# Altium footprint library rus.PcbLib: 72 footprints (part 5 of 5)
Each footprint in its own frame and in the unit in brackets; x right, y up, seen from the top. Pads: shape width x height; smd on the part's side, far side on the other; paste and mask are expansions set on the pad; w line width, h text height; cw(c..) or ccw(c..) is an arc to the next point about the centre after c.
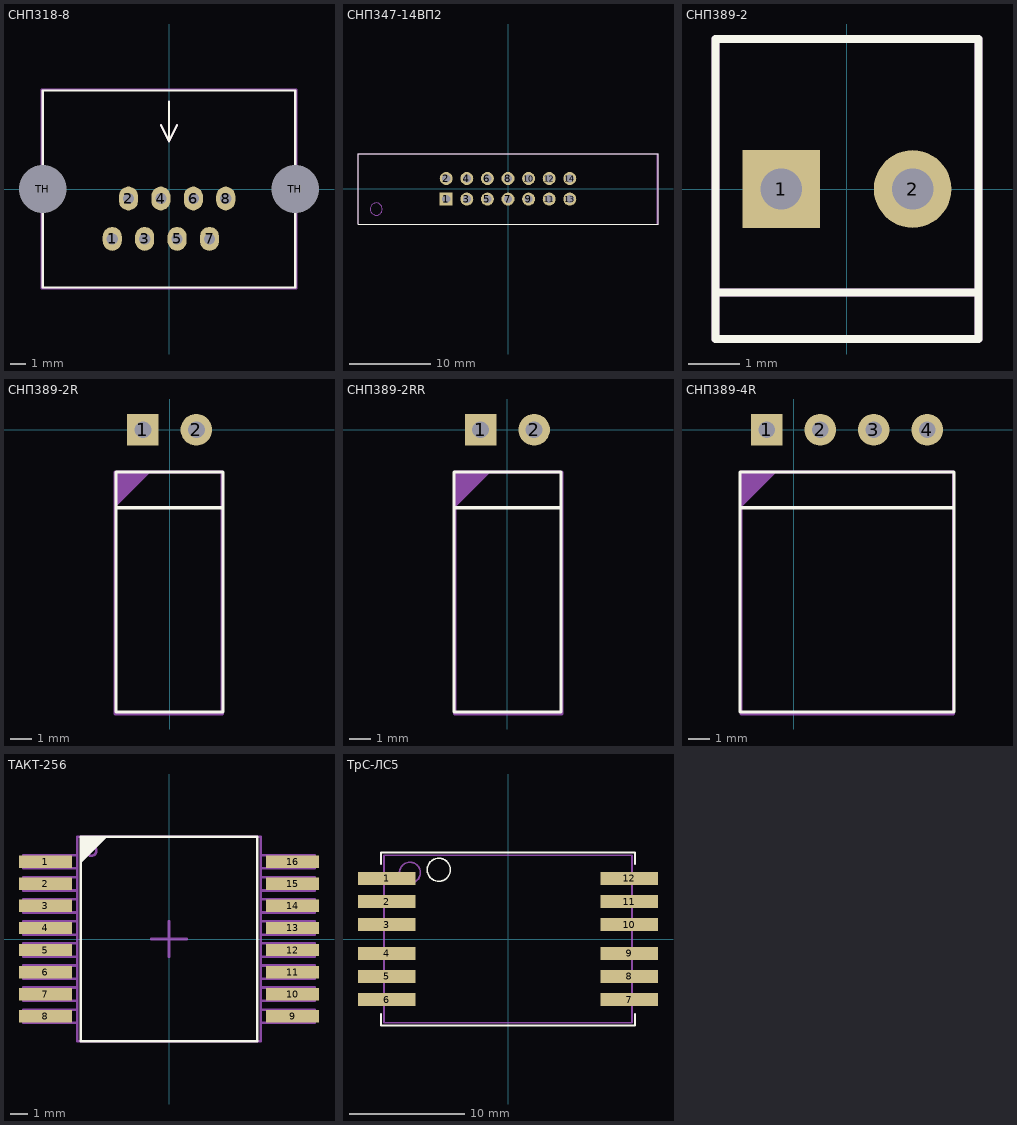
[diagram p4: the footprints below, top view; thin cyan lines are the x and y axes]

## СНП318-8 [mm]
height 19
pads (10):
  oval 1.2x1.5 hole 0.7: 1(-3.57,-3.14) 2(-2.55,-0.6) 3(-1.53,-3.14) 4(-0.51,-0.6) 5(0.51,-3.14) 6(1.53,-0.6) 7(2.55,-3.14) 8(3.57,-0.6)
  round 1 hole 3 unplated: TH(-7.94,0) TH(7.94,0)
Top Overlay:
  lines w0.15: -0.5,4 0,3 ; 0,5.5 0,3 ; 0.5,4 0,3 ; -7.94,-6.2 -7.94,6.2 7.94,6.2 7.94,-6.2 -7.94,-6.2
Mechanical 29:
  lines w0.15: -0.5,4 0,3 ; 0,5.5 0,3 ; 0.5,4 0,3 ; -8,-6.25 8,-6.25 8,6.25 -8,6.25 -8,-6.25
  text ".Designator" at -3.4,-0.2 h1
3D body: height 21, standoff 0, extent -6.5,-6 6.5,6

## СНП347-14ВП2 [mm]
height 28
pads (14):
  rect 1.6x1.6 hole 1: 1(-7.62,-1.27)
  round 1.6 hole 1: 2(-7.62,1.27) 3(-5.08,-1.27) 4(-5.08,1.27) 5(-2.54,-1.27) 6(-2.54,1.27) 7(0,-1.27) 8(0,1.27) 9(2.54,-1.27) 10(2.54,1.27) 11(5.08,-1.27) 12(5.08,1.27) 13(7.62,-1.27) 14(7.62,1.27)
Top Overlay:
  lines w0.15: -18.5,-4.35 -18.5,4.35 18.5,4.35 18.5,-4.35 -18.5,-4.35
Mechanical 1:
  lines w0.15: -18.5,-4.35 -18.5,4.35 18.5,4.35 18.5,-4.35 -18.5,-4.35
Mechanical 29:
  circle w0.15: c-16.25,-2.5 r0.75
  lines w0.15: -18.5,-4.4 -18.5,4.3 18.4,4.3 18.4,-4.4 -18.5,-4.4
  text ".Designator" at -3.4,-0.2 h1
3D body "СНП347-14ВП21-1-В.STEP": height 26.5, standoff -4, extent -18.5,-4.3 18.5,4.4

## СНП389-2 [mm]
height 11.4
pads (2):
  rect 1.5x1.5 hole 0.8: 1(-1.27,0)
  round 1.5 hole 0.8: 2(1.27,0)
Top Overlay:
  lines w0.15: -2.54,-2 2.54,-2 ; -2.54,-2.9 -2.54,2.9 2.54,2.9 2.54,-2.9 -2.54,-2.9
Mechanical 29:
  lines w0.15: -2.54,-2 2.54,-2 ; -2.54,-2.9 -2.54,2.9 2.54,2.9 2.54,-2.9 -2.54,-2.9
  text ".Designator" at -2.1,-0.3 h1

## СНП389-2R [mm]
height 5.8
pads (2):
  rect 1.5x1.5 hole 0.8: 1(-1.27,0)
  round 1.5 hole 0.8: 2(1.27,0)
Top Overlay:
  lines w0.15: -2.54,-3.7 2.54,-3.7 ; -2.54,-13.4 -2.54,-2 2.54,-2 2.54,-13.4 -2.54,-13.4
Mechanical 29:
  region: -2.6,-2 -0.9,-2 -2.6,-3.7
  lines w0.15: -2.6,-13.5 2.5,-13.5 2.5,-2 -2.6,-2 -2.6,-13.5
  text ".Designator" at -2.2,-5.9 h1

## СНП389-2RR [mm]
height 5.8
pads (2):
  rect 1.5x1.5 hole 0.8: 1(-1.27,0)
  round 1.5 hole 0.8: 2(1.27,0)
Top Overlay:
  lines w0.15: -2.54,-3.7 2.54,-3.7 ; -2.54,-13.4 2.54,-13.4 2.54,-2 -2.54,-2 -2.54,-13.4
Mechanical 29:
  region: -2.5,-2 -0.8,-2 -2.5,-3.7
  lines w0.15: -2.5,-13.5 2.6,-13.5 2.6,-2 -2.5,-2 -2.5,-13.5
  text ".Designator" at -1.8,-6.1 h1

## СНП389-4R [mm]
height 5.8
pads (4):
  rect 1.5x1.5 hole 0.8: 1(-1.27,0)
  round 1.5 hole 0.8: 2(1.27,0) 3(3.81,0) 4(6.35,0)
Top Overlay:
  lines w0.15: -2.54,-3.7 2.54,-3.7 7.62,-3.7 ; -2.54,-13.4 -2.54,-2 2.54,-2 7.62,-2 7.62,-13.4 2.54,-13.4 -2.54,-13.4
Mechanical 29:
  region: -2.5,-2 -0.8,-2 -2.5,-3.7
  lines w0.15: -2.5,-13.5 -2.5,-2 7.6,-2 7.6,-13.5 -2.5,-13.5
  text ".Designator" at -0.8,-6.1 h1

## ТАКТ-256 [mm]
height 2.8
pads (16):
  rect 3x0.7 smd: 1(-7,4.375) 2(-7,3.125) 3(-7,1.875) 4(-7,0.625) 5(-7,-0.625) 6(-7,-1.875) 7(-7,-3.125) 8(-7,-4.375) 9(7,-4.375) 10(7,-3.125) 11(7,-1.875) 12(7,-0.625) 13(7,0.625) 14(7,1.875) 15(7,3.125) 16(7,4.375)
Top Overlay:
  region: -3.5,5.8 -5,5.8 -5,4.3
  lines w0.15: -5,-5.8 -5,5.8 5,5.8 5,-5.8 -5,-5.8
Mechanical 15:
  lines w0.15: -1,0 1,0 ; 0,-1 0,1
Mechanical 29:
  circle w0.15: c-4.4,5 r0.283
  lines w0.15: -5.2,-4.75 -8.25,-4.75 -8.25,-4 -5.2,-4 ; -5.2,-3.5 -8.25,-3.5 -8.25,-2.75 -5.2,-2.75 ; -5.2,-2.25 -8.25,-2.25 -8.25,-1.5 -5.2,-1.5 ; -5.2,-1 -8.25,-1 -8.25,-0.25 -5.2,-0.25 ; -5.2,0.25 -8.25,0.25 -8.25,1 -5.2,1 ; -5.2,1.5 -8.25,1.5 -8.25,2.25 -5.2,2.25 ; -5.2,2.75 -8.25,2.75 -8.25,3.5 -5.2,3.5 ; -5.2,4 -8.25,4 -8.25,4.75 -5.2,4.75 ; 5.2,-4.75 8.25,-4.75 8.25,-4 5.2,-4 ; 5.2,-3.5 8.25,-3.5 8.25,-2.75 5.2,-2.75 ; 5.2,-2.25 8.25,-2.25 8.25,-1.5 5.2,-1.5 ; 5.2,-1 8.25,-1 8.25,-0.25 5.2,-0.25 ; 5.2,0.25 8.25,0.25 8.25,1 5.2,1 ; 5.2,1.5 8.25,1.5 8.25,2.25 5.2,2.25 ; 5.2,2.75 8.25,2.75 8.25,3.5 5.2,3.5 ; 5.2,4 8.25,4 8.25,4.75 5.2,4.75 ; -5.2,-5.8 -5.2,5.8 5.2,5.8 5.2,-5.8 -5.2,-5.8
  text ".Designator" at -3.1,-0.2 h1
3D body: height 2.8, standoff 0, extent -5.199,-5.799 5.199,5.799

## ТрС-ЛС5 [mm]
pads (12):
  rect 5x1.1 smd: 1(-10.5,5.25) 2(-10.5,3.25) 3(-10.5,1.25) 4(-10.5,-1.25) 5(-10.5,-3.25) 6(-10.5,-5.25) 7(10.5,-5.25) 8(10.5,-3.25) 9(10.5,-1.25) 10(10.5,1.25) 11(10.5,3.25) 12(10.5,5.25)
Top Overlay:
  circle w0.15: c-6,6 r1
  lines w0.15: -11,-6.5 -11,-7.5 11,-7.5 11,-6.5 ; -11,6.5 -11,7.5 11,7.5 11,6.5
Mechanical 29:
  circle w0.15: c-8.5,5.75 r0.901
  lines w0.15: -10.75,-7.25 10.75,-7.25 10.75,7.25 -10.75,7.25 -10.75,-7.25
  text ".Designator" at -3.8,0.1 h1
3D body: height 5.8, standoff 1, extent -8.75,-6.5 8.75,6.5
3D body: height 1, standoff 0.1, extent -10.75,-7.25 10.75,7.25